# Altium footprint library EMGintegrated.PcbLib: 30 footprints (part 1 of 2)
Each footprint in its own frame and in the unit in brackets; x right, y up, seen from the top. Pads: shape width x height; smd on the part's side, far side on the other; paste and mask are expansions set on the pad; w line width, h text height; cw(c..) or ccw(c..) is an arc to the next point about the centre after c.
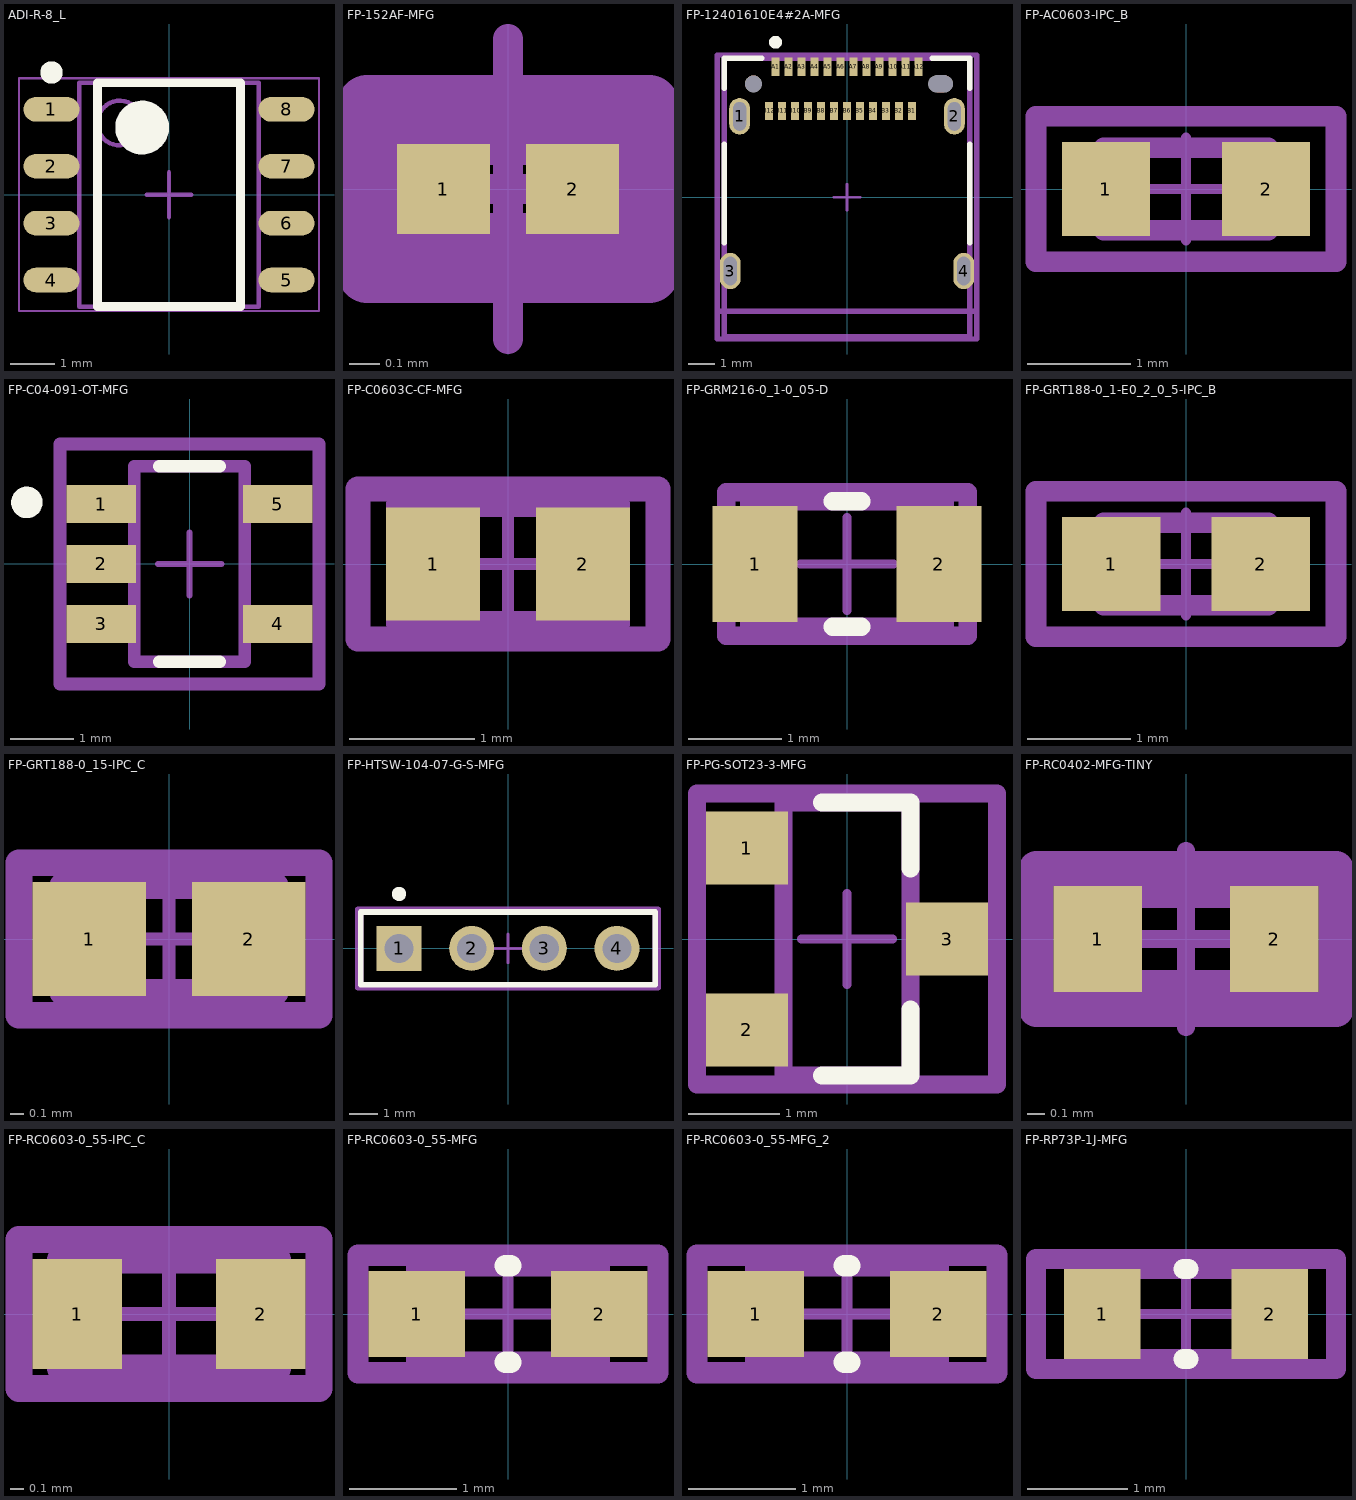
[diagram p0: the footprints below, top view; thin cyan lines are the x and y axes]

## ADI-R-8_L [mm] "SOIC, 8-Leads, Body 5x4mm, Pitch 1.27mm, IPC High Density"
height 1.75
pads (8):
  oval 1.25x0.55 smd: 1(-2.625,1.905) 2(-2.625,0.635) 3(-2.625,-0.635) 4(-2.625,-1.905) 5(2.625,-1.905) 6(2.625,-0.635) 7(2.625,0.635) 8(2.625,1.905)
Top Overlay:
  circle w0.6: c-0.6,1.5 r0.3
  circle w0.25: c-2.625,2.73 r0.125
  lines w0.2: -1.6,-2.5 1.6,-2.5 1.6,2.5 -1.6,2.5 -1.6,-2.5
Top 3D Body:
  circle w0.1: c-1.1,1.6 r0.5
  lines w0.1: -2,-2.5 2,-2.5 2,2.5 -2,2.5 -2,-2.5
Top Courtyard:
  lines w0.05: -3.35,-2.6 3.35,-2.6 3.35,2.6 -3.35,2.6 -3.35,-2.6
  lines w0.1: -0.5,0 0.5,0 ; 0,-0.5 0,0.5
3D body "SOIC127P600X175-8L.step": height 1.75, standoff 0, extent -3,-2.5 3,2.5

## FP-152AF-MFG [mm]
pads (2):
  rect 0.31x0.3 smd paste+0 mask+0: 1(-0.215,0) 2(0.215,0)
Top Assembly:
  lines w0.2: -0.47,-0.28 0.47,-0.28 0.47,0.28 -0.47,0.28 -0.47,-0.28
  text ".Designator" at 0.203,0.406 h0.61
Top 3D Body:
  lines w0.2: -0.33,-0.18 0.33,-0.18 0.33,0.18 -0.33,0.18 -0.33,-0.18
Top Courtyard:
  lines w0.2: -0.47,-0.28 0.47,-0.28 0.47,0.28 -0.47,0.28 -0.47,-0.28
Top Component Center:
  lines w0.1: -0.5,0 0.5,0 ; 0,-0.5 0,0.5
3D body "Diode_On_Semiconductor_SZESD8472MUT5G_eec.STEP": height 0.33, standoff 0, extent -0.31,-0.16 0.31,0.16

## FP-12401610E4#2A-MFG [mm]
pads (30):
  oval 0.8x1.4 hole 0.5 slot 1.1 at 90 deg: 1(-4.13,3.115) 2(4.13,3.115) 3(-4.49,-2.835) 4(4.49,-2.835)
  rect 0.3x0.7 smd paste+0 mask+0: A1(-2.75,5.025) A2(-2.25,5.025) A3(-1.75,5.025) A4(-1.25,5.025) A5(-0.75,5.025) A6(-0.25,5.025) A7(0.25,5.025) A8(0.75,5.025) A9(1.25,5.025) A10(1.75,5.025) A11(2.25,5.025) A12(2.75,5.025) B1(2.5,3.325) B2(2,3.325) B3(1.5,3.325) B4(1,3.325) B5(0.5,3.325) B6(0,3.325) B7(-0.5,3.325) B8(-1,3.325) B9(-1.5,3.325) B10(-2,3.325) B11(-2.5,3.325) B12(-3,3.325)
  round 0.65 hole 0.65 unplated: ""(-3.6,4.365)
  oval 0.95x0.65 hole 0.65 slot 0.95 at 0 deg unplated: ""(3.6,4.365)
Top Overlay:
  circle w0.25: c-2.75,5.965 r0.125
  lines w0.2: -4.725,-1.76 -4.725,2.04 ; -4.725,4.19 -4.725,5.35 -3.275,5.35 ; 3.275,5.35 4.725,5.35 4.725,4.19 ; 4.725,-1.76 4.725,2.04
Top Assembly:
  lines w0.2: -4.99,-5.45 -4.99,5.475 4.99,5.475 4.99,-5.45 -4.99,-5.45
  text ".Designator" at 0,0.013 h1
Top 3D Body:
  lines w0.2: -4.99,-4.385 4.99,-4.385 ; -4.725,-5.35 -4.725,5.35 4.725,5.35 4.725,-5.35 -4.725,-5.35
Top Courtyard:
  lines w0.2: -4.99,-5.45 -4.99,5.475 4.99,5.475 4.99,-5.45 -4.99,-5.45
Top Component Center:
  lines w0.1: -0.5,0 0.5,0 ; 0,-0.5 0,0.5
3D body "Conn_Amphenol_12401610E4#2A_eec.STEP": height 3.43, standoff -1.3, extent -4.6,-5.225 4.6,5.325

## FP-AC0603-IPC_B [mm]
pads (2):
  rect 0.859x0.912 smd paste+0 mask+0: 1(-0.777,0) 2(0.777,0)
Top Assembly:
  lines w0.2: -1.456,-0.706 -1.456,0.706 1.456,0.706 1.456,-0.706 -1.456,-0.706
  text ".Designator" at 0.203,0.406 h0.61
Top 3D Body:
  lines w0.2: -0.8,-0.4 -0.8,0.4 0.8,0.4 0.8,-0.4 -0.8,-0.4
Top Courtyard:
  lines w0.2: -1.456,-0.706 -1.456,0.706 1.456,0.706 1.456,-0.706 -1.456,-0.706
Top Component Center:
  lines w0.1: -0.5,0 0.5,0 ; 0,-0.5 0,0.5
3D body "Res_Yageo_AC0603FR-07180RL_eec.STEP": height 0.25, standoff 0, extent -1.456,-0.706 1.456,0.706

## FP-C04-091-OT-MFG [mm]
pads (5):
  rect 1.1x0.6 smd paste+0 mask+0: 1(-1.4,0.95) 2(-1.4,0) 3(-1.4,-0.95) 4(1.4,-0.95) 5(1.4,0.95)
Top Overlay:
  circle w0.25: c-2.575,0.975 r0.125
  lines w0.2: -0.475,-1.55 0.475,-1.55 ; -0.475,1.55 0.475,1.55
Top Assembly:
  lines w0.2: -2.05,-1.9 -2.05,1.9 2.05,1.9 2.05,-1.9 -2.05,-1.9
  text ".Designator" at 0,0 h1
Top 3D Body:
  lines w0.2: -0.875,-1.55 -0.875,1.55 0.875,1.55 0.875,-1.55 -0.875,-1.55
Top Courtyard:
  lines w0.2: -2.05,-1.9 -2.05,1.9 2.05,1.9 2.05,-1.9 -2.05,-1.9
Top Component Center:
  lines w0.1: -0.5,0 0.5,0 ; 0,-0.5 0,0.5
3D body "IC_Microchip_MCP6V71T-E-OTVAO_eec.STEP": height 0.25, standoff 0, extent -2.05,-1.9 2.05,1.9

## FP-C0603C-CF-MFG [mm]
pads (2):
  rect 0.75x0.9 smd paste+0 mask+0: 1(-0.6,0) 2(0.6,0)
Top Assembly:
  lines w0.2: -1.2,-0.6 -1.2,0.6 1.2,0.6 1.2,-0.6 -1.2,-0.6
  text ".Designator" at 0.203,0.406 h0.61
Top 3D Body:
  lines w0.2: -0.875,-0.475 -0.875,0.475 0.875,0.475 0.875,-0.475 -0.875,-0.475
Top Courtyard:
  lines w0.2: -1.2,-0.6 -1.2,0.6 1.2,0.6 1.2,-0.6 -1.2,-0.6
Top Component Center:
  lines w0.1: -0.5,0 0.5,0 ; 0,-0.5 0,0.5
3D body "Cap_KEMET_C0603C272M5JACTU_eec.STEP": height 0.87, standoff 0, extent -0.8,-0.4 0.8,0.4

## FP-GRM216-0_1-0_05-D [mil]
pads (2):
  rect 36x49.21 smd paste+0 mask+0: 1(-39,0) 2(39,0)
Top Overlay:
  lines w7.87: -6,-26.57 6,-26.57 ; -6,26.57 6,26.57
Top Assembly:
  lines w7.87: -51.18,-30.51 51.18,-30.51 51.18,30.51 -51.18,30.51 -51.18,-30.51
  text ".Designator" at 8,16 h24
Top 3D Body:
  lines w7.87: -41.34,-26.57 41.34,-26.57 41.34,26.57 -41.34,26.57 -41.34,-26.57
Top Courtyard:
  lines w7.87: -51.18,-30.51 51.18,-30.51 51.18,30.51 -51.18,30.51 -51.18,-30.51
Top Component Center:
  lines w3.94: -19.68,0 19.68,0 ; 0,-19.68 0,19.68
3D body "Cap_Murata_GRM2165C1H223GA01J_eec.STEP": height 10, standoff 0, extent -51.18,-30.51 51.18,30.51

## FP-GRT188-0_1-E0_2_0_5-IPC_B [mm]
pads (2):
  rect 0.959x0.912 smd paste+0 mask+0: 1(-0.727,0) 2(0.727,0)
Top Assembly:
  lines w0.2: -1.456,-0.706 1.456,-0.706 1.456,0.706 -1.456,0.706 -1.456,-0.706
  text ".Designator" at 0.203,0.406 h0.61
Top 3D Body:
  lines w0.2: -0.8,-0.4 0.8,-0.4 0.8,0.4 -0.8,0.4 -0.8,-0.4
Top Courtyard:
  lines w0.2: -1.456,-0.706 1.456,-0.706 1.456,0.706 -1.456,0.706 -1.456,-0.706
Top Component Center:
  lines w0.1: -0.5,0 0.5,0 ; 0,-0.5 0,0.5
3D body "Cap_Murata_GRT1885C2A561JA02J_eec.STEP": height 0.25, standoff 0, extent -1.456,-0.706 1.456,0.706

## FP-GRT188-0_15-IPC_C [mm]
pads (2):
  rect 0.856x0.858 smd paste+0 mask+0: 1(-0.601,0) 2(0.601,0)
Top Assembly:
  lines w0.2: -1.129,-0.575 -1.129,0.575 1.129,0.575 1.129,-0.575 -1.129,-0.575
  text ".Designator" at 0,0.189 h1
Top 3D Body:
  lines w0.2: -0.8,-0.4 -0.8,0.4 0.8,0.4 0.8,-0.4 -0.8,-0.4
Top Courtyard:
  lines w0.2: -1.129,-0.575 -1.129,0.575 1.129,0.575 1.129,-0.575 -1.129,-0.575
Top Component Center:
  lines w0.1: -0.5,0 0.5,0 ; 0,-0.5 0,0.5
3D body "Cap_Murata_GRT188R61C475KE13J_eec.STEP": height 0.95, standoff 0, extent -0.8,-0.4 0.8,0.4

## FP-HTSW-104-07-G-S-MFG [mm]
pads (4):
  rect 1.57x1.57 hole 1.02 paste-2539.97 mask+0: 1(-3.81,0)
  round 1.57 hole 1.02 paste-2539.97 mask+0: 2(-1.27,0) 3(1.27,0) 4(3.81,0)
Top Overlay:
  circle w0.25: c-3.81,1.905 r0.125
  lines w0.2: -5.143,-1.27 -5.143,1.27 5.143,1.27 5.143,-1.27 -5.143,-1.27
Top Assembly:
  lines w0.2: -5.243,-1.37 -5.243,1.37 5.243,1.37 5.243,-1.37 -5.243,-1.37
  text ".Designator" at 0.203,0.406 h0.61
Top 3D Body:
  lines w0.2: -5.143,-1.27 -5.143,1.27 5.143,1.27 5.143,-1.27 -5.143,-1.27
Top Courtyard:
  lines w0.2: -5.243,-1.37 -5.243,1.37 5.243,1.37 5.243,-1.37 -5.243,-1.37
Top Component Center:
  lines w0.1: -0.5,0 0.5,0 ; 0,-0.5 0,0.5
3D body "Conn_Samtec_HTSW-104-07-G-S_eec.STEP": height 8.71, standoff -2.34, extent -5.08,-1.248 5.08,1.245

## FP-PG-SOT23-3-MFG [mm]
pads (3):
  rect 0.9x0.8 smd paste+0 mask+0: 1(-1.1,1) 2(-1.1,-1) 3(1.1,0)
Top Overlay:
  lines w0.2: -0.275,-1.5 0.7,-1.5 0.7,-0.775 ; -0.275,1.5 0.7,1.5 0.7,0.775
Top Assembly:
  lines w0.2: -1.65,-1.6 1.65,-1.6 1.65,1.6 -1.65,1.6 -1.65,-1.6
  text ".Designator" at 0,0 h1
Top 3D Body:
  lines w0.2: -0.7,-1.5 0.7,-1.5 0.7,1.5 -0.7,1.5 -0.7,-1.5
Top Courtyard:
  lines w0.2: -1.65,-1.6 1.65,-1.6 1.65,1.6 -1.65,1.6 -1.65,-1.6
Top Component Center:
  lines w0.1: -0.5,0 0.5,0 ; 0,-0.5 0,0.5
3D body "Trans_Infineon_2N7002H6327XTSA2_eec.STEP": height 1.04, standoff -0.01, extent -1.27,-1.45 1.37,1.45

## FP-RC0402-MFG-TINY [mm]
pads (2):
  rect 0.5x0.6 smd paste+0 mask+0: 1(-0.5,0) 2(0.5,0)
Top Assembly:
  lines w0.2: -0.85,-0.4 0.85,-0.4 0.85,0.4 -0.85,0.4 -0.85,-0.4
  text ".Designator" at -0.551,0.152 h0.61
Top 3D Body:
  lines w0.2: -0.525,-0.275 0.525,-0.275 0.525,0.275 -0.525,0.275 -0.525,-0.275
Top Courtyard:
  lines w0.2: -0.85,-0.4 0.85,-0.4 0.85,0.4 -0.85,0.4 -0.85,-0.4
Top Component Center:
  lines w0.1: -0.5,0 0.5,0 ; 0,-0.5 0,0.5
3D body "Res_Yageo_RC0402FR-075KL_eec.STEP": height 0.25, standoff 0, extent -0.85,-0.4 0.85,0.4

## FP-RC0603-0_55-IPC_C [mm]
pads (2):
  rect 0.659x0.812 smd paste+0 mask+0: 1(-0.677,0) 2(0.677,0)
Top Assembly:
  lines w0.2: -1.106,-0.55 1.106,-0.55 1.106,0.55 -1.106,0.55 -1.106,-0.55
  text ".Designator" at 0.203,0.406 h0.61
Top 3D Body:
  lines w0.2: -0.8,-0.4 0.8,-0.4 0.8,0.4 -0.8,0.4 -0.8,-0.4
Top Courtyard:
  lines w0.2: -1.106,-0.55 1.106,-0.55 1.106,0.55 -1.106,0.55 -1.106,-0.55
Top Component Center:
  lines w0.1: -0.5,0 0.5,0 ; 0,-0.5 0,0.5
3D body "Res_Yageo_RC0603FR-07100KL_eec.STEP": height 0.55, standoff 0, extent -0.8,-0.4 0.8,0.4

## FP-RC0603-0_55-MFG [mm]
pads (2):
  rect 0.9x0.8 smd paste+0 mask+0: 1(-0.85,0) 2(0.85,0)
Top Overlay:
  lines w0.2: -0.025,-0.45 0.025,-0.45 ; -0.025,0.45 0.025,0.45
Top Assembly:
  lines w0.2: -1.4,-0.55 -1.4,0.55 1.4,0.55 1.4,-0.55 -1.4,-0.55
  text ".Designator" at 0.203,0.406 h0.61
Top 3D Body:
  lines w0.2: -0.85,-0.45 -0.85,0.45 0.85,0.45 0.85,-0.45 -0.85,-0.45
Top Courtyard:
  lines w0.2: -1.4,-0.55 -1.4,0.55 1.4,0.55 1.4,-0.55 -1.4,-0.55
Top Component Center:
  lines w0.1: -0.5,0 0.5,0 ; 0,-0.5 0,0.5
3D body "Res_Yageo_RC0603FR-07100KL_eec.STEP": height 0.55, standoff 0, extent -0.8,-0.4 0.8,0.4

## FP-RC0603-0_55-MFG_2 [mm]
pads (2):
  rect 0.9x0.8 smd paste+0 mask+0: 1(-0.85,0) 2(0.85,0)
Top Overlay:
  lines w0.2: -0.025,-0.45 0.025,-0.45 ; -0.025,0.45 0.025,0.45
Top Assembly:
  lines w0.2: -1.4,-0.55 1.4,-0.55 1.4,0.55 -1.4,0.55 -1.4,-0.55
  text ".Designator" at 0.203,0.406 h0.61
Top 3D Body:
  lines w0.2: -0.85,-0.45 0.85,-0.45 0.85,0.45 -0.85,0.45 -0.85,-0.45
Top Courtyard:
  lines w0.2: -1.4,-0.55 1.4,-0.55 1.4,0.55 -1.4,0.55 -1.4,-0.55
Top Component Center:
  lines w0.1: -0.5,0 0.5,0 ; 0,-0.5 0,0.5
3D body "Res_Yageo_RC0603FR-07100KL_eec.STEP": height 0.25, standoff 0, extent -1.4,-0.55 1.4,0.55

## FP-RP73P-1J-MFG [mil]
pads (2):
  rect 30x35.43 smd paste+0 mask+0: 1(-33,0) 2(33,0)
Top Overlay:
  lines w7.87: -0.98,-17.72 0.98,-17.72 ; -0.98,17.72 0.98,17.72
Top Assembly:
  lines w7.87: -59.06,-21.65 59.06,-21.65 59.06,21.65 -59.06,21.65 -59.06,-21.65
  text ".Designator" at 8,16 h24
Top 3D Body:
  lines w7.87: -32.48,-17.72 32.48,-17.72 32.48,17.72 -32.48,17.72 -32.48,-17.72
Top Courtyard:
  lines w7.87: -59.06,-21.65 59.06,-21.65 59.06,21.65 -59.06,21.65 -59.06,-21.65
Top Component Center:
  lines w3.94: -19.68,0 19.68,0 ; 0,-19.68 0,19.68
3D body "Res_TE_Connectivity_RP73PF1J93K1BTDF_eec.STEP": height 10, standoff 0, extent -59.06,-21.65 59.06,21.65